# Altium schematic symbol library ACE1V3225-201-R.SchLib: 1 symbol
Pins are listed as number, name and electrical type; pins without a type are passive.

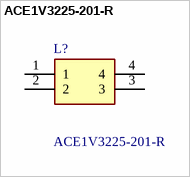
[diagram p0: symbol ACE1V3225-201-R]

## ACE1V3225-201-R
designator L?
200 H @ 100 kHz 2 Line Common Mode Choke Surface Mount 70mA DCR 4.8Ohm; Manufacturer_Name: Eaton; Geometry.Height: 2.5mm; Mouser Part Number: 504-ACE1V3225-201-R; Mouser Price/Stock: https://www.mouser.co.uk/ProductDetail/Coiltronics-Eaton/ACE1V3225-201-R?qs=YwPsRIUVAOfqgf6EEzwZ8A%3D%3D; Manufacturer_Part_Number: ACE1V3225-201-R; Datasheet Link: https://www.eaton.com/content/dam/eaton/products/electronic-components/resources/data-sheet/eaton-ace1v3225-automotive-common-mode-chip-inductor-data-sheet.pdf
footprint ACE1V3225201R
pins: 1, 2, 3, 4